# Altium footprint library PogoPinPad.PcbLib: 2 footprints
Each footprint in its own frame and in the unit in brackets; x right, y up, seen from the top. Pads: shape width x height; smd on the part's side, far side on the other; paste and mask are expansions set on the pad; w line width, h text height; cw(c..) or ccw(c..) is an arc to the next point about the centre after c.
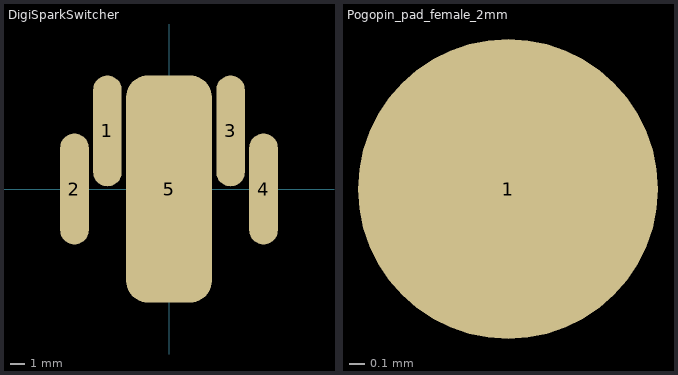
[diagram p0: the footprints below, top view; thin cyan lines are the x and y axes]

## DigiSparkSwitcher [mm]
pads (5):
  oval 2x7.765 smd paste-2539.97 mask+0: 1(-4.308,4.067) 2(-6.617,0) 3(4.308,4.067) 4(6.617,0)
  rrect50% 6x15.9 smd paste-2539.97 mask+0: 5(0,0)
Top Solder:
  rectangle: -7.747,-8.128 7.747,8.128

## Pogopin_pad_female_2mm [mm]
pads (1):
  round 2 smd paste-2539.97: 1(-3.683,-2.159)